# Altium footprint library CustomCase.PcbLib: 411 footprints (part 16 of 26)
Each footprint in its own frame and in the unit in brackets; x right, y up, seen from the top. Pads: shape width x height; smd on the part's side, far side on the other; paste and mask are expansions set on the pad; w line width, h text height; cw(c..) or ccw(c..) is an arc to the next point about the centre after c.
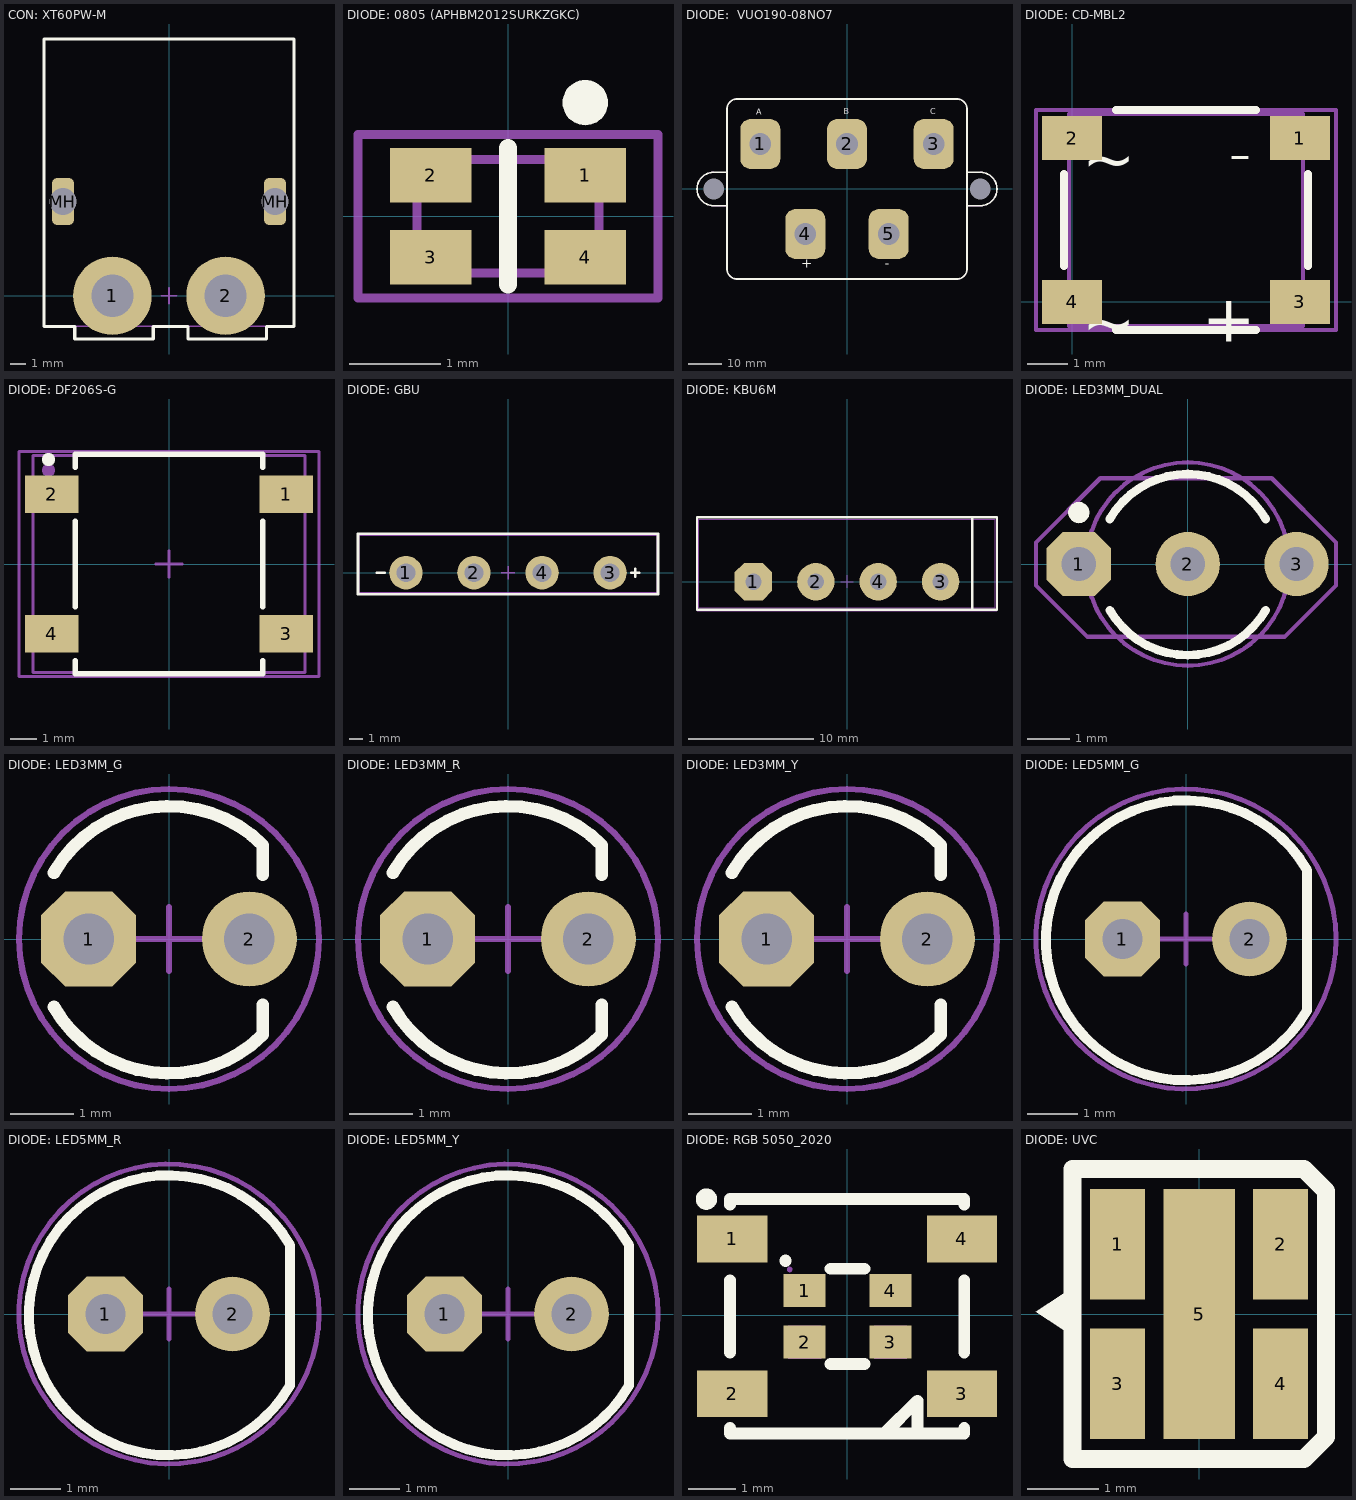
[diagram p15: the footprints below, top view; thin cyan lines are the x and y axes]

## CON: XT60PW-M [mm]
pads (4):
  round 5 hole 2.7: 1(-3.6,0) 2(3.6,0)
  rrect50% 1.4x3 hole 1.7 square: MH(-6.75,6) MH(6.75,6)
Top Overlay:
  lines w0.2: -7.95,-1.95 -6,-1.95 -6,-2.75 -1,-2.75 -1,-1.95 1.2,-1.95 1.2,-2.75 6.2,-2.75 6.2,-1.95 7.95,-1.95 7.95,16.35 -7.95,16.35 -7.95,-1.95
Top Assy:
  lines w0.1: -7.95,-1.95 7.95,-1.95 7.95,16.35 -7.95,16.35 -7.95,-1.95
Size Area:
  lines w0.1: -0.5,0 0.5,0 ; 0,-0.5 0,0.5 ; -7.95,-1.95 -7.95,16.35 7.95,16.35 7.95,-1.95 6.2,-1.95 6.2,-2.75 1.2,-2.75 1.2,-1.95 -1,-1.95 -1,-2.75 -6,-2.75 -6,-1.95 -7.95,-1.95
3D body "XT60PW.SLDPRT": height 8.5, standoff -2, extent -7.95,-1.95 7.95,16.35

## DIODE: 0805 (APHBM2012SURKZGKC) [mm]
pads (5):
  rect 0.9x0.6 smd: 1(0.85,0.45) 2(-0.85,0.45) 3(-0.85,-0.45) 4(0.85,-0.45)
  round 0.5 on Top Overlay: ""(0.85,1.25)
Top Overlay:
  lines w0.2: 0,-0.75 0,0.75
Top Assy:
  lines w0.1: -1,-0.625 -1,0.625 1,0.625 1,-0.625 -1,-0.625
Size Area:
  lines w0.1: -1.65,-0.9 -1.65,0.9 1.65,0.9 1.65,-0.9 -1.65,-0.9
3D body "APHBM2012.STEP": height 0.43, standoff -0.03, extent -1,-0.625 1,0.625

## DIODE:  VUO190-08NO7 [mm]
pads (7):
  rrect50% 12x15 hole 6.5: 1(-26,13.5) 2(0,13.5) 3(26,13.5) 4(-12.5,-13.5) 5(12.5,-13.5)
  round 0 hole 6.2: MH(-40,0) MH(40,0)
Top Overlay:
  lines w0.5: -36,-5 -40,-5 cw(c-40,0) -40,5 -36,5 ; 36,-5 40,-5 ccw(c40,0) 40,5 36,5 ; -36,-24 ccw(c-33,-24) -33,-27 33,-27 ccw(c33,-24) 36,-24 36,24 ccw(c33,24) 33,27 -33,27 ccw(c-33,24) -36,24 -36,-24
  text "+" at -13.75,-24.743 h5
  text "-" at 11.25,-24.75 h5
  text "C" at 25,21.75 h3
  text "B" at -1,21.75 h3
  text "A" at -27.25,21.743 h3
Top Assy:
  lines w0.1: -36,-5 -40,-5 cw(c-40,0) -40,5 -36,5 ; 36,-5 40,-5 ccw(c40,0) 40,5 36,5 ; -36,-24 ccw(c-33,-24) -33,-27 33,-27 ccw(c33,-24) 36,-24 36,24 ccw(c33,24) 33,27 -33,27 ccw(c-33,24) -36,24 -36,-24
Size Area:
  lines w0.1: -36,-5 -40,-5 cw(c-40,0) -40,5 -36,5 ; 36,-5 40,-5 ccw(c40,0) 40,5 36,5 ; -36,-24 ccw(c-33,-24) -33,-27 33,-27 ccw(c33,-24) 36,-24 36,24 ccw(c33,24) 33,27 -33,27 ccw(c-33,24) -36,24 -36,-24

## DIODE: CD-MBL2 [mm]
pads (4):
  rect 1.5x1.1 smd: 1(5.7,4.1) 2(0,4.1) 3(5.7,0) 4(0,0)
Top Overlay:
  lines w0.2: -0.2,0.9 -0.2,3.2 ; 1.1,-0.7 4.6,-0.7 ; 1.1,4.8 4.6,4.8 ; 5.9,0.9 5.9,3.2
  text "~" at 1.6,4.4 h2
  text "~" at 1.6,0.3 h2
  text "+" at 4.6,0.4 h2
  text "-" at 4.5,4.4 h2
Top Assy:
  lines w0.1: -0.07,-0.6 5.77,-0.6 5.77,4.7 -0.07,4.7 -0.07,-0.6
  text "~" at 0.9,0.3 h2
  text "~" at 0.9,4.4 h2
  text "-" at 5.2,4.4 h2
  text "+" at 5.2,0.4 h2
Size Area:
  lines w0.1: -0.9,-0.7 -0.9,4.8 6.6,4.8 6.6,-0.7 -0.9,-0.7
3D body "CD-MBL206SL.STEP": height 1.22, standoff 0, extent -0.07,-0.6 5.77,4.7

## DIODE: DF206S-G [mm]
height 22
pads (6):
  rect 2x1.4 smd: 1(4.37,2.605) 2(-4.37,2.605) 3(4.37,-2.605) 4(-4.37,-2.605)
  round 0.5 on Mech1: ""(-4.5,3.5)
  round 0.5 on Top Overlay: ""(-4.5,3.9)
Top Overlay:
  lines w0.2: -3.5,-3.6 -3.5,-4.1 3.5,-4.1 3.5,-3.6 ; -3.5,-1.6 -3.5,1.6 ; -3.5,3.6 -3.5,4.1 3.5,4.1 3.5,3.6 ; 3.5,-1.6 3.5,1.6
Top Assy:
  lines w0.1: -5.075,-4.05 -5.075,4.05 5.075,4.05 5.075,-4.05 -5.075,-4.05
Size Area:
  lines w0.1: -0.5,0 0.5,0 ; 0,-0.5 0,0.5 ; -5.6,-4.2 -5.6,4.2 5.6,4.2 5.6,-4.2 -5.6,-4.2
3D body "User Library-PONTE-1.STEP": height 2.7, standoff 0, extent -5.075,-4.05 5.075,4.05

## DIODE: GBU [mm] "SMD Diode Bridge"
height 2
pads (4):
  round 2.5 hole 1.4: 1(-7.62,0) 2(-2.54,0) 3(7.62,0) 4(2.54,0)
Top Overlay:
  lines w0.2: -9.8,0 -9.2,0 ; 9.2,0 9.8,0 ; 9.5,-0.3 9.5,0.3 ; -11.2,-1.6 -11.2,2.9 11.2,2.9 11.2,-1.6 -11.2,-1.6
Top Assy:
  lines w0.1: -9.8,0 -9.2,0 ; 9.2,0 9.8,0 ; 9.5,-0.3 9.5,0.3 ; -11.15,-1.5 -11.15,2.81 11.15,2.81 11.15,-0.8 11.15,-1.5 -11.15,-1.5
Size Area:
  lines w0.1: -0.5,0 0.5,0 ; 0,-0.5 0,0.5 ; -11.2,-1.6 -11.2,2.9 11.2,2.9 11.2,-1.6 -11.2,-1.6
3D body "User Library-GBU10A.STEP": height 23.8, standoff -13.1, extent -11.15,-0.8 11.15,2.81

## DIODE: KBU6M [mm]
height 22
pads (4):
  oct 3x3 hole 1.3: 1(-7.5,0)
  round 3 hole 1.3: 2(-2.5,0) 3(7.5,0) 4(2.5,0)
Top Overlay:
  lines w0.2: 10.04,-2.25 10.04,5.15 ; -12.025,-2.25 -12.025,5.15 12.025,5.15 12.025,-2.25 -12.025,-2.25
Top Assy:
  lines w0.1: 10,-2.1 10,5 ; -11.875,-2.1 -11.875,5 11.875,5 11.875,-2.1 -11.875,-2.1
Size Area:
  lines w0.1: -0.5,0 0.5,0 ; 0,-0.5 0,0.5 ; -12.025,-2.31 12.025,-2.31 12.025,5.15 -12.025,5.15 -12.025,-2.31
3D body "KBU6M.STEP": height 19.8, standoff -2, extent -11.85,-2.1 11.85,5

## DIODE: LED3MM_DUAL [mm]
height 10
pads (4):
  oct 1.5x1.5 hole 0.8: 1(-2.54,0)
  round 1.5 hole 0.8: 2(0,0) 3(2.54,0)
  round 0.5 on Top Overlay: ""(-2.54,1.2)
Top Overlay:
  lines w0.2: -1.819,-1.075 ccw(c0,-0.025) 1.819,-1.075 ; -1.819,1.05 cw(c0,0) 1.819,1.05
Top Assy:
  circle w0.1: c0,0 r2.372
Size Area:
  lines w0.1: -3.54,-0.5 -3.54,0.5 -2.04,2 1.96,2 3.46,0.5 3.46,-0.5 2.26,-1.7 -2.34,-1.7 -3.54,-0.5 ; -0.5,0 0.5,0 -0.5,0 ; 0,-0.5 0,0.5 0,-0.5
3D body "3mm_led_dual.STEP": height 11.5, standoff -1, extent -2.844,-1.75 2.84,1.75

## DIODE: LED3MM_G [mm] "Green Leaded Led, 3 mm"
height 12
pads (2):
  oct 1.5x1.5 hole 0.8: 1(-1.27,0)
  round 1.5 hole 0.8: 2(1.27,0)
Top Overlay:
  lines w0.2: -1.819,-1.075 ccw(c0,-0.025) 1.485,-1.51 1.485,-1.04 ; -1.819,1.05 cw(c0,0) 1.485,1.485 1.485,1.015
Top Assy:
  circle w0.1: c0,0 r2.372
Size Area:
  circle w0.1: c0,0 r2.372
  lines w0.1: -0.5,0 0.5,0 ; 0,-0.5 0,0.5
3D body "3mm_led_grn.STEP": height 12, standoff -1, extent -2,-2 2,2

## DIODE: LED3MM_R [mm] "Red Leaded Led, 3 mm"
height 12
pads (2):
  oct 1.5x1.5 hole 0.8: 1(-1.27,0)
  round 1.5 hole 0.8: 2(1.27,0)
Top Overlay:
  lines w0.2: -1.819,-1.075 ccw(c0,-0.025) 1.485,-1.51 1.485,-1.04 ; -1.819,1.05 cw(c0,0) 1.485,1.485 1.485,1.015
Top Assy:
  circle w0.1: c0,0 r2.372
Size Area:
  circle w0.1: c0,0 r2.372
  lines w0.1: -0.5,0 0.5,0 ; 0,-0.5 0,0.5
3D body "3mm_led_red.STEP": height 12, standoff -1, extent -2,-2 2,2

## DIODE: LED3MM_Y [mm] "Yellow Leaded Led, 3 mm"
height 12
pads (2):
  oct 1.5x1.5 hole 0.8: 1(-1.27,0)
  round 1.5 hole 0.8: 2(1.27,0)
Top Overlay:
  lines w0.2: 1.485,-1.51 cw(c0,-0.025) -1.819,-1.075 ccw(c0,-0.025) 1.485,-1.51 ; 1.485,-1.51 1.485,-1.04 1.485,-1.51 ; 1.485,1.485 ccw(c0,0) -1.819,1.05 cw(c0,0) 1.485,1.485 ; 1.485,1.485 1.485,1.015 1.485,1.485
Top Assy:
  circle w0.1: c0,0 r2.372
Size Area:
  circle w0.1: c0,0 r2.372
  lines w0.1: -0.5,0 0.5,0 ; 0,-0.5 0,0.5
3D body "3mm_led_yell.STEP": height 12, standoff -1, extent -2,-2 2,2

## DIODE: LED5MM_G [mm] "Green Leaded Led, 5 mm"
height 12
pads (2):
  oct 1.5x1.5 hole 0.8: 1(-1.27,0)
  round 1.5 hole 0.8: 2(1.27,0)
Top Overlay:
  lines w0.2: 2.425,-1.425 cw(c0,-0.025) 2.425,1.375 2.425,-1.425
Top Assy:
  circle w0.1: c0,0 r3
Size Area:
  circle w0.1: c0,0 r3
  lines w0.1: -0.5,0 0.5,0 ; 0,-0.5 0,0.5
3D body "5mm_led_grn.STEP": height 14.5, standoff -1, extent -3,-3 3,3

## DIODE: LED5MM_R [mm] "Red Leaded Led, 5 mm"
height 12
pads (2):
  oct 1.5x1.5 hole 0.8: 1(-1.27,0)
  round 1.5 hole 0.8: 2(1.27,0)
Top Overlay:
  lines w0.2: 2.425,-1.425 cw(c0,-0.025) 2.425,1.375 2.425,-1.425
Top Assy:
  circle w0.1: c0,0 r3
Size Area:
  circle w0.1: c0,0 r3
  lines w0.1: -0.5,0 0.5,0 ; 0,-0.5 0,0.5
3D body "5mm_led_red.STEP": height 14.5, standoff -1, extent -3,-3 3,3

## DIODE: LED5MM_Y [mm] "Yellow Leaded Led, 5 mm"
height 12
pads (2):
  oct 1.5x1.5 hole 0.8: 1(-1.27,0)
  round 1.5 hole 0.8: 2(1.27,0)
Top Overlay:
  lines w0.2: 2.425,-1.425 cw(c0,-0.025) 2.425,1.375 2.425,-1.425
Top Assy:
  circle w0.1: c0,0 r3
Size Area:
  circle w0.1: c0,0 r3
  lines w0.1: -0.5,0 0.5,0 ; 0,-0.5 0,0.5
3D body "5mm_led_yell.STEP": height 14.5, standoff -1, extent -3,-3 3,3

## DIODE: RGB 5050_2020 [mm]
pads (8):
  rect 1.501x0.998 smd: 1(-2.451,1.625) 2(-2.451,-1.675)
  rect 0.9x0.7 smd: 1(-0.905,0.525) 2(-0.905,-0.575) 3(0.925,-0.575) 4(0.925,0.525)
  rect 1.499x0.998 smd: 3(2.449,-1.675) 4(2.449,1.625)
Top Layer:
  lines w0.254: -2.451,1.625 -2.005,1.625
Top Overlay:
  circle w0.254: c-3.001,2.475 r0.1
  lines w0.254: -2.501,-2.405 -2.501,-2.525 2.499,-2.525 2.499,-2.405 ; -2.501,-0.795 -2.501,0.745 ; -2.501,2.355 -2.501,2.475 2.499,2.475 2.499,2.355 ; -1.314,1.156 -1.314,1.168 ; -0.355,-1.041 0.375,-1.041 ; -0.355,0.991 0.375,0.991 ; 2.499,-0.795 2.499,0.745 ; 0.799,-2.525 1.499,-2.525 1.499,-1.825 0.799,-2.525
Outside border (Mech5):
  region: -1.255,0.875 -0.555,0.875 -0.555,0.175 -1.255,0.175
  region: -1.255,-0.225 -0.555,-0.225 -0.555,-0.925 -1.255,-0.925
  region: 0.575,-0.225 1.275,-0.225 1.275,-0.925 0.575,-0.925
  region: 0.575,0.875 1.275,0.875 1.275,0.175 0.575,0.175
Mechanical 6:
  circle w0.06: c-1.225,0.975 r0.03
3D body "User Library-ws2812B-1.step": height 0.8, standoff -0.77, extent -2.7,-2.525 2.7,2.475

## DIODE: UVC [mm]
pads (5):
  rect 0.77x1.55 smd: 1(-1.142,0.975) 2(1.144,0.975) 3(-1.142,-0.975) 4(1.144,-0.975)
  rect 1x3.5 smd: 5(0.001,0)
Top Overlay:
  region: -1.905,0.286 -1.905,-0.222 -2.286,0.032
  lines w0.254: -1.777,-2.032 -1.777,2.032 1.468,2.032 1.779,1.721 1.779,-1.721 1.468,-2.032 -1.777,-2.032
Size Area:
  lines w0.003: -0.215,0.324 -0.165,0.375